# Altium schematic symbol library 2N5401YTA.SchLib: 1 symbol
Pins are listed as number, name and electrical type; pins without a type are passive.

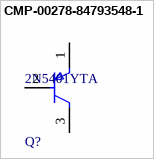
[diagram p0: symbol CMP-00278-84793548-1]

## CMP-00278-84793548-1
designator Q?, comment 2N5401YTA
2N5401YTA Bipolar (BJT) Transistor PNP 150 V 600 mA 400MHz 625 mW Through Hole TO-92-3; Manufacturer Lifecycle Status: ACTIVE; NexarPartId: 84793548; Voltage Rating (DC): -160V; Number of Elements: 1; Collector Emitter Breakdown Voltage: 150V; Max Collector Current: 600mA; Collector Base Voltage (VCBO): 160V; Emitter Base Voltage (VEBO): 5V; Current Rating: -600mA; Power Dissipation: 625mW; Element Configuration: Single; Case/Package: TO-92-3; Min Operating Temperature: -55°C; Lead Free: Lead Free; Transition Frequency: 400MHz; Collector Emitter Voltage (VCEO): 150V; Weight: 240mg; Frequency: 400MHz; RoHS: Compliant; Lifecycle Status: Production; Schedule B: 8541210080; Number of Pins: 3; Max Operating Temperature: 150°C; Mount: Through Hole; Polarity: PNP; Max Power Dissipation: 625mW; Gain Bandwidth Product: 400MHz
footprint FP-135AR-MFG
pins: 1 E, 2 B, 3 C